# Altium schematic symbol library CRG0805F10K.SchLib: 1 symbol
Pins are listed as number, name and electrical type; pins without a type are passive.

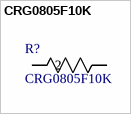
[diagram p0: symbol CRG0805F10K]

## CRG0805F10K
designator R?
CRG0805 1% 10K; Manufacturer_Name: TE Connectivity; Copyright: Copyright (C) 2026 Ultra Librarian. All rights reserved.; Manufacturer_Part_Number: CRG0805F10K
footprint RES0805_CRG_TYCO_TYC
pins: 1, 2